# Altium footprint library TIE_2025.PcbLib: 27 footprints (part 1 of 2)
Each footprint in its own frame and in the unit in brackets; x right, y up, seen from the top. Pads: shape width x height; smd on the part's side, far side on the other; paste and mask are expansions set on the pad; w line width, h text height; cw(c..) or ccw(c..) is an arc to the next point about the centre after c.
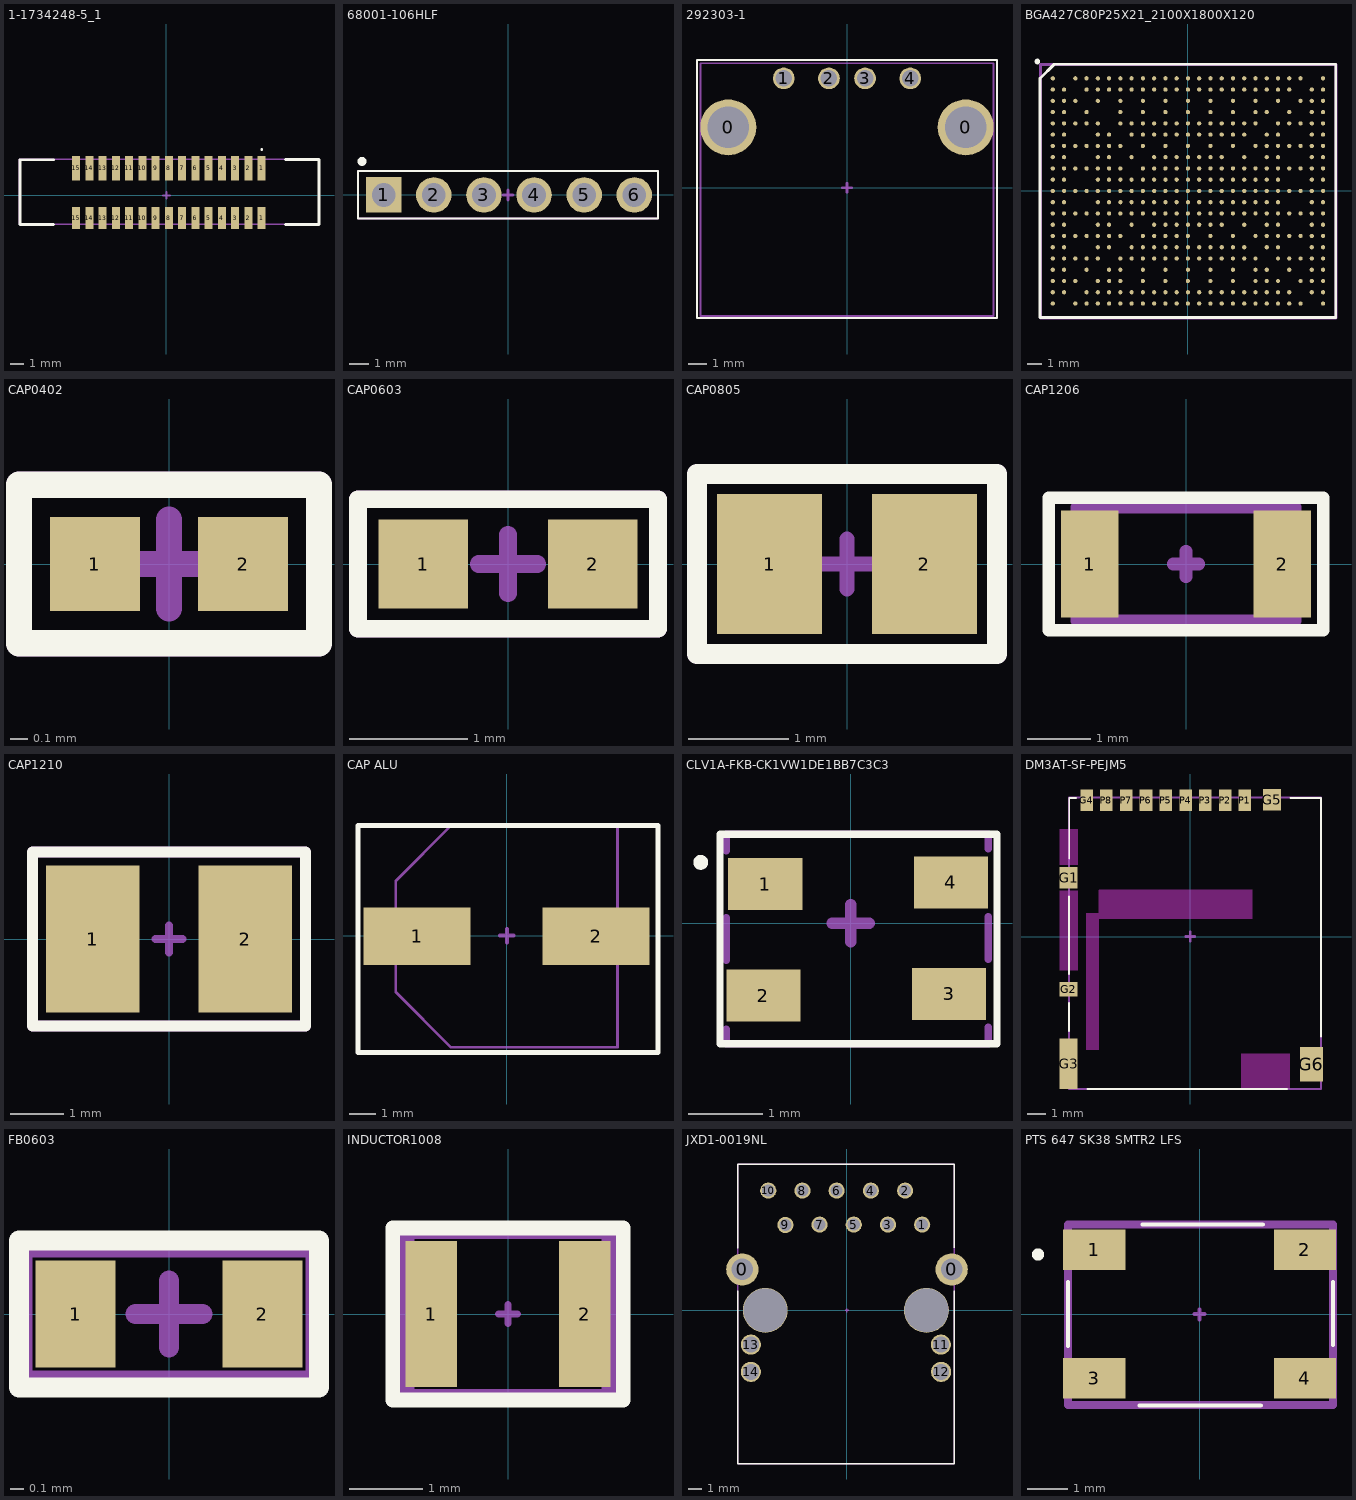
[diagram p0: the footprints below, top view; thin cyan lines are the x and y axes]

## 1-1734248-5_1 [mm] "CON FPC 1mm 15P Female SMD VERT"
pads (30):
  rect 0.6x1.65 smd: 1(7.178,-1.727) 2(6.178,-1.727) 3(5.178,-1.727) 4(4.178,-1.727) 5(3.178,-1.727) 6(2.178,-1.727) 7(1.178,-1.727) 8(0.178,-1.727) 9(-0.822,-1.727) 10(-1.822,-1.727) 11(-2.822,-1.727) 12(-3.822,-1.727) 13(-4.822,-1.727) 14(-5.822,-1.727) 15(-6.822,-1.727)
  rect 0.6x1.85 smd: 1(7.178,2.023) 2(6.178,2.023) 3(5.178,2.023) 4(4.178,2.023) 5(3.178,2.023) 6(2.178,2.023) 7(1.178,2.023) 8(0.178,2.023) 9(-0.822,2.023) 10(-1.822,2.023) 11(-2.822,2.023) 12(-3.822,2.023) 13(-4.822,2.023) 14(-5.822,2.023) 15(-6.822,2.023)
Top Overlay:
  lines w0.1: 7.178,3.398 ccw(c7.178,3.448) 7.178,3.498 ; 7.178,3.398 cw(c7.178,3.448) 7.178,3.498 ; 7.178,3.398 ccw(c7.178,3.448) 7.178,3.498
  lines w0.2: -8.526,-2.2 -11.048,-2.2 -11.048,2.67 -8.526,2.67 ; 8.978,-2.2 11.5,-2.2 11.5,2.698 8.978,2.698
Top Component Center:
  lines w0.15: -0.25,0 0.25,0 ; 0,-0.25 0,0.25
Top Assembly:
  lines w0.1: -11.122,-2.2 -11.122,2.7 11.478,2.7 11.478,-2.2 -11.122,-2.2
  text ".Designator" at -1.244,-0.157 h0.5
3D body "1-1734248-5.stp": height 5.68, standoff 0, extent -11.022,-2.239 11.378,2.611

## 68001-106HLF [mm]
pads (6):
  rect 1.8x1.8 hole 1.2: 1(-6.3,0)
  round 1.8 hole 1.2: 2(-3.76,0) 3(-1.22,0) 4(1.32,0) 5(3.86,0) 6(6.4,0)
Top Overlay:
  circle w0.254: c-7.4,1.7 r0.1
  lines w0.1: -7.6,-1.2 7.6,-1.2 7.6,1.2 -7.6,1.2 -7.6,-1.2
Top Component Center:
  lines w0.15: -0.25,0 0.25,0 ; 0,-0.25 0,0.25
Top Assembly:
  lines w0.1: -7.6,-1.2 7.6,-1.2 7.6,1.2 -7.6,1.2 -7.6,-1.2
  text ".Designator" at -1.219,-0.257 h0.5
3D body "68001-106HLF.stp": height 8.18, standoff -3.25, extent -7.62,-1.213 7.62,1.2

## 292303-1 [mm]
pads (6):
  round 3.1 hole 2.3 mask+0.1: 0(-6.57,3.345) 0(6.57,3.345)
  round 1.2 hole 0.92 mask+0.1: 1(-3.5,6.055) 2(-1,6.055) 3(1,6.055) 4(3.5,6.055)
Top Overlay:
  lines w0.1: -8.3,-7.2 8.3,-7.2 8.3,2.075 8.3,6.605 8.3,7.065 -8.3,7.065 -8.3,5.2 -8.3,1.6 -8.3,-7.2
Top Component Center:
  lines w0.15: -0.25,0 0.25,0 ; 0,-0.25 0,0.25
Top Assembly:
  lines w0.1: -8.1,-7.1 8.1,-7.1 8.1,6.89 -8.1,6.89 -8.1,-7.1
  text ".Designator" at -2.599,-0.167 h0.5
3D body "292303-1.stp": height 8.62, standoff -2.74, extent -8.116,-7.1 8.116,6.9

## BGA427C80P25X21_2100X1800X120 [mm]
pads (427):
  round 0.3 smd mask+0.05: A1(-9.6,8) A3(-8,8) A4(-7.2,8) A5(-6.4,8) A6(-5.6,8) A7(-4.8,8) A8(-4,8) A9(-3.2,8) A10(-2.4,8) A11(-1.6,8) A12(-0.8,8) A13(0,8) A14(0.8,8) A15(1.6,8) A16(2.4,8) A17(3.2,8) A18(4,8) A19(4.8,8) A20(5.6,8) A21(6.4,8) A22(7.2,8) A23(8,8) A25(9.6,8) AA1(-9.6,-8) AA3(-8,-8) AA4(-7.2,-8) AA5(-6.4,-8) AA6(-5.6,-8) AA7(-4.8,-8) AA8(-4,-8) AA9(-3.2,-8) AA10(-2.4,-8) AA11(-1.6,-8) AA12(-0.8,-8) AA13(0,-8) AA14(0.8,-8) AA15(1.6,-8) AA16(2.4,-8) AA17(3.2,-8) AA18(4,-8) AA19(4.8,-8) AA20(5.6,-8) AA21(6.4,-8) AA22(7.2,-8) AA23(8,-8) AA25(9.6,-8) B1(-9.6,7.2) B2(-8.8,7.2) B4(-7.2,7.2) B5(-6.4,7.2) B6(-5.6,7.2) B7(-4.8,7.2) B8(-4,7.2) B9(-3.2,7.2) B10(-2.4,7.2) B11(-1.6,7.2) B12(-0.8,7.2) B13(0,7.2) B14(0.8,7.2) B15(1.6,7.2) B16(2.4,7.2) B17(3.2,7.2) B18(4,7.2) B19(4.8,7.2) B20(5.6,7.2) B21(6.4,7.2) B22(7.2,7.2) B24(8.8,7.2) B25(9.6,7.2) C1(-9.6,6.4) C2(-8.8,6.4) C3(-8,6.4) C5(-6.4,6.4) C7(-4.8,6.4) C9(-3.2,6.4) C11(-1.6,6.4) C13(0,6.4) C15(1.6,6.4) C17(3.2,6.4) C19(4.8,6.4) C21(6.4,6.4) C23(8,6.4) C24(8.8,6.4) C25(9.6,6.4) D1(-9.6,5.6) D2(-8.8,5.6) D4(-7.2,5.6) D7(-4.8,5.6) D9(-3.2,5.6) D11(-1.6,5.6) D13(0,5.6) D15(1.6,5.6) D17(3.2,5.6) D19(4.8,5.6) D20(5.6,5.6) D22(7.2,5.6) D24(8.8,5.6) D25(9.6,5.6) E1(-9.6,4.8) E2(-8.8,4.8) E3(-8,4.8) E4(-7.2,4.8) E5(-6.4,4.8) E7(-4.8,4.8) E8(-4,4.8) E9(-3.2,4.8) E10(-2.4,4.8) E11(-1.6,4.8) E12(-0.8,4.8) E13(0,4.8) E14(0.8,4.8) E15(1.6,4.8) E16(2.4,4.8) E17(3.2,4.8) E18(4,4.8) E19(4.8,4.8) E21(6.4,4.8) E22(7.2,4.8) E23(8,4.8) E24(8.8,4.8) E25(9.6,4.8) F1(-9.6,4) F2(-8.8,4) F5(-6.4,4) F6(-5.6,4) F8(-4,4) F9(-3.2,4) F10(-2.4,4) F11(-1.6,4) F12(-0.8,4) F13(0,4) F14(0.8,4) F15(1.6,4) F16(2.4,4) F17(3.2,4) F18(4,4) F20(5.6,4) F21(6.4,4) F24(8.8,4) F25(9.6,4) G1(-9.6,3.2) G2(-8.8,3.2) G3(-8,3.2) G4(-7.2,3.2) G5(-6.4,3.2) G6(-5.6,3.2) G7(-4.8,3.2) G9(-3.2,3.2) G11(-1.6,3.2) G13(0,3.2) G15(1.6,3.2) G17(3.2,3.2) G19(4.8,3.2) G20(5.6,3.2) G21(6.4,3.2) G22(7.2,3.2) G23(8,3.2) G24(8.8,3.2) G25(9.6,3.2) H1(-9.6,2.4) H2(-8.8,2.4) H5(-6.4,2.4) H6(-5.6,2.4) H8(-4,2.4) H10(-2.4,2.4) H11(-1.6,2.4) H12(-0.8,2.4) H13(0,2.4) H14(0.8,2.4) H15(1.6,2.4) H16(2.4,2.4) H18(4,2.4) H20(5.6,2.4) H21(6.4,2.4) H24(8.8,2.4) H25(9.6,2.4) J1(-9.6,1.6) J2(-8.8,1.6) J3(-8,1.6) J4(-7.2,1.6) J5(-6.4,1.6) J6(-5.6,1.6) J7(-4.8,1.6) J9(-3.2,1.6) J10(-2.4,1.6) J11(-1.6,1.6) J12(-0.8,1.6) J13(0,1.6) J14(0.8,1.6) J15(1.6,1.6) J16(2.4,1.6) J17(3.2,1.6) J18(4,1.6) J19(4.8,1.6) J20(5.6,1.6) J21(6.4,1.6) J22(7.2,1.6) J23(8,1.6) J24(8.8,1.6) J25(9.6,1.6) K1(-9.6,0.8) K2(-8.8,0.8) K5(-6.4,0.8) K6(-5.6,0.8) K7(-4.8,0.8) K8(-4,0.8) K9(-3.2,0.8) K10(-2.4,0.8) K11(-1.6,0.8) K12(-0.8,0.8) K13(0,0.8) K14(0.8,0.8) K15(1.6,0.8) K16(2.4,0.8) K17(3.2,0.8) K18(4,0.8) K19(4.8,0.8) K20(5.6,0.8) K21(6.4,0.8) K24(8.8,0.8) K25(9.6,0.8) L1(-9.6,0) L2(-8.8,0) L3(-8,0) L4(-7.2,0) L5(-6.4,0) L6(-5.6,0) L7(-4.8,0) L8(-4,0) L9(-3.2,0) L10(-2.4,0) L11(-1.6,0) L12(-0.8,0) L13(0,0) L14(0.8,0) L15(1.6,0) L16(2.4,0) L17(3.2,0) L18(4,0) L19(4.8,0) L20(5.6,0) L21(6.4,0) L22(7.2,0) L23(8,0) L24(8.8,0) L25(9.6,0) M1(-9.6,-0.8) M2(-8.8,-0.8) M5(-6.4,-0.8) M6(-5.6,-0.8) M7(-4.8,-0.8) M8(-4,-0.8) M9(-3.2,-0.8) M10(-2.4,-0.8) M11(-1.6,-0.8) M12(-0.8,-0.8) M13(0,-0.8) M14(0.8,-0.8) M15(1.6,-0.8) M16(2.4,-0.8) M17(3.2,-0.8) M18(4,-0.8) M19(4.8,-0.8) M20(5.6,-0.8) M21(6.4,-0.8) M24(8.8,-0.8) M25(9.6,-0.8) N1(-9.6,-1.6) N2(-8.8,-1.6) N3(-8,-1.6) N4(-7.2,-1.6) N5(-6.4,-1.6) N6(-5.6,-1.6) N7(-4.8,-1.6) N8(-4,-1.6) N9(-3.2,-1.6) N10(-2.4,-1.6) N11(-1.6,-1.6) N12(-0.8,-1.6) N13(0,-1.6) N14(0.8,-1.6) N15(1.6,-1.6) N16(2.4,-1.6) N17(3.2,-1.6) N18(4,-1.6) N19(4.8,-1.6) N20(5.6,-1.6) N21(6.4,-1.6) N22(7.2,-1.6) N23(8,-1.6) N24(8.8,-1.6) N25(9.6,-1.6) P1(-9.6,-2.4) P2(-8.8,-2.4) P5(-6.4,-2.4) P6(-5.6,-2.4) P8(-4,-2.4) P10(-2.4,-2.4) P11(-1.6,-2.4) P12(-0.8,-2.4) P13(0,-2.4) P14(0.8,-2.4) P15(1.6,-2.4) P16(2.4,-2.4) P18(4,-2.4) P20(5.6,-2.4) P21(6.4,-2.4) P24(8.8,-2.4) P25(9.6,-2.4) R1(-9.6,-3.2) R2(-8.8,-3.2) R3(-8,-3.2) R4(-7.2,-3.2) R5(-6.4,-3.2) R6(-5.6,-3.2) R7(-4.8,-3.2) R9(-3.2,-3.2) R10(-2.4,-3.2) R11(-1.6,-3.2) R12(-0.8,-3.2) R13(0,-3.2) R15(1.6,-3.2) R17(3.2,-3.2) R19(4.8,-3.2) R20(5.6,-3.2) R21(6.4,-3.2) R22(7.2,-3.2) R23(8,-3.2) R24(8.8,-3.2) R25(9.6,-3.2) T1(-9.6,-4) T2(-8.8,-4) T5(-6.4,-4) T6(-5.6,-4) T8(-4,-4) T9(-3.2,-4) T10(-2.4,-4) T11(-1.6,-4) T12(-0.8,-4) T13(0,-4) T14(0.8,-4) T15(1.6,-4) T16(2.4,-4) T17(3.2,-4) T18(4,-4) T20(5.6,-4) T21(6.4,-4) T24(8.8,-4) T25(9.6,-4) U1(-9.6,-4.8) U2(-8.8,-4.8) U3(-8,-4.8) U4(-7.2,-4.8) U5(-6.4,-4.8) U7(-4.8,-4.8) U8(-4,-4.8) U9(-3.2,-4.8) U10(-2.4,-4.8) U11(-1.6,-4.8) U12(-0.8,-4.8) U13(0,-4.8) U14(0.8,-4.8) U15(1.6,-4.8) U16(2.4,-4.8) U17(3.2,-4.8) U18(4,-4.8) U19(4.8,-4.8) U21(6.4,-4.8) U22(7.2,-4.8) U23(8,-4.8) U24(8.8,-4.8) U25(9.6,-4.8) V1(-9.6,-5.6) V2(-8.8,-5.6) V4(-7.2,-5.6) V6(-5.6,-5.6) V7(-4.8,-5.6) V9(-3.2,-5.6) V11(-1.6,-5.6) V13(0,-5.6) V15(1.6,-5.6) V17(3.2,-5.6) V19(4.8,-5.6) V20(5.6,-5.6) V22(7.2,-5.6) V24(8.8,-5.6) V25(9.6,-5.6) W1(-9.6,-6.4) W2(-8.8,-6.4) W3(-8,-6.4) W5(-6.4,-6.4) W6(-5.6,-6.4) W7(-4.8,-6.4) W9(-3.2,-6.4) W11(-1.6,-6.4) W13(0,-6.4) W15(1.6,-6.4) W17(3.2,-6.4) W19(4.8,-6.4) W20(5.6,-6.4) W21(6.4,-6.4) W23(8,-6.4) W24(8.8,-6.4) W25(9.6,-6.4) Y1(-9.6,-7.2) Y2(-8.8,-7.2) Y4(-7.2,-7.2) Y5(-6.4,-7.2) Y6(-5.6,-7.2) Y7(-4.8,-7.2) Y8(-4,-7.2) Y9(-3.2,-7.2) Y10(-2.4,-7.2) Y11(-1.6,-7.2) Y12(-0.8,-7.2) Y13(0,-7.2) Y14(0.8,-7.2) Y15(1.6,-7.2) Y16(2.4,-7.2) Y17(3.2,-7.2) Y18(4,-7.2) Y19(4.8,-7.2) Y20(5.6,-7.2) Y21(6.4,-7.2) Y22(7.2,-7.2) Y24(8.8,-7.2) Y25(9.6,-7.2)
Top Overlay:
  circle w0.2: c-10.693,9.195 r0.1
  lines w0.2: -10.5,-9 -10.5,8 -9.5,9 10.5,9 10.5,-9 -10.5,-9
Top Assembly:
  lines w0.2: -10.48,-9.02 10.52,-9.02 10.52,8.98 -10.48,8.98 -10.48,-9.02
3D body "SAMA7G54D2G-I_4UB.stp": height 1.2, standoff 0, extent -10.56,-8.99 10.44,9.01

## CAP0402 [mm]
pads (2):
  rect 0.51x0.535 smd mask+0.05: 1(-0.42,0) 2(0.42,0)
Top Overlay:
  lines w0.15: -0.85,-0.45 0.85,-0.45 0.85,0.45 -0.85,0.45 -0.85,-0.45
Top Component Center:
  lines w0.15: -0.25,0 0.25,0 ; 0,-0.25 0,0.25
Top Assembly:
  lines w0.15: -0.85,-0.45 0.85,-0.45 0.85,0.45 -0.85,0.45 -0.85,-0.45
  text ".Designator" at -0.569,-0.257 h0.5
3D body "Ceramic_Capacitor_0402_h20mil.step": height 0.51, standoff 0, extent -0.508,-0.254 0.508,0.254

## CAP0603 [mm]
pads (2):
  rect 0.76x0.76 smd mask+0.05: 1(-0.72,0) 2(0.72,0)
Top Overlay:
  lines w0.15: -1.275,-0.55 1.275,-0.55 1.275,0.55 -1.275,0.55 -1.275,-0.55
Top Component Center:
  lines w0.15: -0.25,0 0.25,0 ; 0,-0.25 0,0.25
Top Assembly:
  lines w0.15: -1.275,-0.55 -1.275,0.55 1.275,0.55 1.275,-0.55 -1.275,-0.55
  text ".Designator" at -0.579,-0.247 h0.5
3D body "Ceramic_Capacitor_0603_h32mil.step": height 0.8, standoff 0, extent -0.8,-0.4 0.8,0.4

## CAP0805 [mm]
pads (2):
  rect 1.05x1.4 smd mask+0.05: 1(-0.775,0) 2(0.775,0)
Top Overlay:
  lines w0.2: -1.5,-0.9 1.5,-0.9 1.5,0.9 -1.5,0.9 -1.5,-0.9
Top Component Center:
  lines w0.15: -0.25,0 0.25,0 ; 0,-0.25 0,0.25
Top Assembly:
  lines w0.2: -1.5,-0.9 1.5,-0.9 1.5,0.9 -1.5,0.9 -1.5,-0.9
  text ".Designator" at -0.549,-0.227 h0.5
3D body "Ceramic_Capacitor_0805_h50mil.step": height 1.26, standoff 0.01, extent -1,-0.625 1,0.625

## CAP1206 [mil]
pads (2):
  rect 35.98x67.01 smd mask+1.97: 1(-60,0) 2(60,0)
Top Overlay:
  lines w7.87: -85.63,-41.34 -85.63,-9.84 -85.63,41.34 62.99,41.34 85.63,41.34 85.63,-19.68 85.63,-41.34 -52.17,-41.34 -85.63,-41.34
Top Component Center:
  lines w7.87: 0,-7.87 0,0 ; 7.87,0 0,0 ; 0,0 0,7.87 0,0 ; 0,0 -7.87,0 0,0
Top Assembly:
  lines w7.87: -67.91,-35.43 67.91,-35.43 67.91,35.43 -67.91,35.43 -67.91,-35.43
  text ".Designator" at -23.98,-8.13 h19.68
3D body "CircuitWorks-CAPACITOR 1206.STEP": height 65.04, standoff -0.32, extent -62.99,-30.7 63,30.71

## CAP1210 [mm]
pads (2):
  rect 1.75x2.75 smd paste+0 mask+0.102: 1(-1.425,0) 2(1.425,0)
Top Overlay:
  lines w0.2: -2.55,-1.625 -2.55,1.625 2.55,1.625 2.55,-1.625 -2.55,-1.625
Top Component Center:
  lines w0.15: -0.25,0 0.25,0 ; 0,-0.25 0,0.25
Top Assembly:
  lines w0.2: -2.55,-1.625 -2.55,1.625 2.55,1.625 2.55,-1.625 -2.55,-1.625
  text ".Designator" at -0.589,-0.237 h0.5
3D body "Cap_Samsung_Electro-Mechanics_America_Inc_CL32C472JBFNNNE_eec.STEP": height 2.8, standoff 0, extent -1.6,-1.25 1.6,1.25

## CAP ALU [mm]
pads (2):
  rect 4x2.15 smd: 1(-3.35,-0.025) 2(3.35,-0.025)
Top Overlay:
  lines w0.2: -5.563,-4.369 -5.563,4.125 -5.35,4.125 4.15,4.125 5.664,4.125 5.664,-4.369 -5.563,-4.369
Top Component Center:
  lines w0.15: -0.24,0 0.26,0 ; 0.01,-0.25 0.01,0.25
Top Assembly:
  lines w0.1: -4.15,-2.1 -4.15,2.05 -2.075,4.125 4.15,4.125 4.15,-4.175 -2.075,-4.175 -4.15,-2.1
  text ".Designator" at -0.549,-0.197 h0.5
3D body "UWT1E331MNL1GS.stp": height 10.5, standoff 0, extent -4.65,-4.275 4.65,4.225

## CLV1A-FKB-CK1VW1DE1BB7C3C3 [mm]
pads (4):
  rect 1x0.7 smd mask+0.05: 1(-1.15,0.525) 2(-1.175,-0.975) 3(1.325,-0.95) 4(1.35,0.55)
Top Overlay:
  lines w0.1: -1.97,0.82 cw(c-2.02,0.82) -1.97,0.824 ; -1.76,-1.625 1.97,-1.625 1.97,1.2 -1.76,1.2 -1.76,-1.625
Mechanical 1:
Top Component Center:
  lines w0.15: -0.25,0 0.25,0 ; 0,-0.25 0,0.25
Top Assembly:
  lines w0.1: -1.675,-1.425 -1.675,-1.625 1.85,-1.625 1.85,-1.4 ; -1.675,-0.5 -1.675,0.075 ; -1.675,0.975 -1.675,1.2 1.85,1.2 1.85,1 ; 1.85,-0.487 1.85,0.088
  text ".Designator" at -0.639,-0.247 h0.5
3D body "CLV1A-FKB-CK1VW1DE1BB7C3C3.stp": height 2.1, standoff 0, extent -1.65,-1.625 1.85,1.175

## DM3AT-SF-PEJM5 [mm]
pads (14):
  rect 1x1.2 smd: G1(-6.75,3.275) G5(4.55,7.6)
  rect 1x0.8 smd: G2(-6.75,-2.925)
  rect 1x2.8 smd: G3(-6.75,-7.075)
  rect 0.7x1.2 smd: G4(-5.75,7.572) P1(3.05,7.572) P2(1.95,7.572) P3(0.85,7.572) P4(-0.25,7.572) P5(-1.35,7.572) P6(-2.45,7.572) P7(-3.55,7.572) P8(-4.65,7.572)
  rect 1.3x1.9 smd: G6(6.75,-7.1)
Top Overlay:
  lines w0.1: -6.735,-3.701 -6.725,-5.25 ; -6.735,-2.101 -6.735,2.225 ; -6.71,4.325 -6.71,7.703 -6.329,7.703 ; -5.694,-8.475 5.4,-8.475 ; 5.584,7.703 7.285,7.703 7.285,-5.563
Keep-Out Layer:
  region: -7.245,2.55 -6.255,2.55 -6.255,-1.87 -7.245,-1.87
  region: -7.241,5.966 -6.25,5.966 -6.25,4.003 -7.241,3.997
  region: -5.065,2.575 -5.039,2.6 3.45,2.6 3.45,1 3.114,1 -5.065,1
  region: -5.777,1.3 -5.073,1.3 -5.073,-6.3 -5.777,-6.3
  region: 2.85,-6.525 5.55,-6.525 5.55,-8.425 2.85,-8.425
Top Component Center:
  lines w0.15: -0.24,0 0.26,0 ; 0.01,-0.25 0.01,0.25
Top Assembly:
  lines w0.1: -6.725,-8.475 7.275,-8.475 7.275,7.725 -6.725,7.725 -6.725,-8.475
  text ".Designator" at -0.319,-0.687 h0.5
3D body "DM3AT-SF-PEJM5.stp": height 1.64, standoff -0.04, extent -6.725,-8.4 7.224,7.75

## FB0603 [mm]
pads (2):
  rect 0.6x0.8 smd mask+0.05: 1(-0.7,0) 2(0.7,0)
Top Overlay:
  lines w0.15: -1.125,-0.55 -1.125,0.55 1.125,0.55 1.125,-0.55 -1.125,-0.55
Top Component Center:
  lines w0.15: -0.25,0 0.25,0 ; 0,-0.25 0,0.25
Top Assembly:
  lines w0.15: -1.1,-0.5 1.1,-0.5 1.1,0.5 -1.1,0.5 -1.1,-0.5
  text ".Designator" at -0.569,-0.247 h0.5
3D body "0603_RES.stp": height 0.46, standoff 0, extent -0.8,-0.4 0.8,0.4

## INDUCTOR1008 [mm]
pads (2):
  rect 0.7x2 smd mask+0.05: 1(-1.05,0) 2(1.05,0)
Top Overlay:
  lines w0.2: -1.575,-1.175 1.575,-1.175 1.575,1.175 -1.575,1.175 -1.575,-1.175
Top Component Center:
  lines w0.1: -0.125,0 0.125,0 ; 0,-0.125 0,0.125
Top Assembly:
  lines w0.2: -1.375,-1.125 1.375,-1.125 1.375,1.125 -1.375,1.125 -1.375,-1.125
  text ".Designator" at -0.559,-0.237 h0.5
3D body "DFE252012PD-R47M=P2.STEP": height 1.2, standoff 0, extent -1.25,-1 1.25,1

## JXD1-0019NL [mm]
pads (18):
  round 2.4 hole 1.6 mask+0.05: 0(-7.775,3.039) 0(7.775,3.039)
  round 1.2 hole 0.9 mask+0.05: 1(5.582,6.364) 2(4.312,8.889) 3(3.042,6.364) 4(1.772,8.889) 5(0.502,6.364) 6(-0.768,8.889) 7(-2.038,6.364) 8(-3.308,8.889) 9(-4.578,6.339) 10(-5.848,8.889)
  round 1.5 hole 1.2 mask+0.05: 11(6.972,-2.541) 12(6.987,-4.571) 13(-7.138,-2.541) 14(-7.138,-4.571)
  round 3.33 hole 3.25 unplated mask+0.05: ""(-6.068,-0.001) ""(5.902,-0.001)
Top Overlay:
  lines w0.1: -8.128,1.443 -8.128,-11.41 7.975,-11.41 7.975,1.473 ; -8.128,4.618 -8.128,10.867 7.963,10.867 7.963,4.661
Top Component Center:
  lines w0.1: -0.125,0 0.125,0 ; 0,-0.133 0,0.117
Top Assembly:
  lines w0.1: 7.959,-10.433 7.959,-11.408 7.712,-11.408 -8.128,-11.408 -8.128,10.867 7.962,10.867 7.962,-10.628
  text ".Designator" at -2.423,2.064 h0.5
3D body "JXD1-0019NL_3D.STEP": height 13.7, standoff -3.7, extent -8.154,-11.359 7.896,10.891

## PTS 647 SK38 SMTR2 LFS [mm]
pads (4):
  rect 1.55x1 smd mask+0.05: 1(-2.625,1.6) 2(2.625,1.6) 3(-2.625,-1.6) 4(2.625,-1.6)
Top Overlay:
  lines w0.1: -3.275,-0.8 -3.275,0.8 ; -1.5,-2.275 1.525,-2.275 ; -1.425,2.225 1.575,2.225 ; 3.325,-0.775 3.325,0.8
  lines w0.2: -4.075,1.483 cw(c-4.025,1.483) -3.975,1.483 cw(c-4.025,1.483) -4.075,1.483
Top Component Center:
  lines w0.1: -0.125,0 0.125,0 ; 0,-0.133 0,0.117
Top Assembly:
  lines w0.2: -3.275,-2.267 3.325,-2.267 3.325,2.233 -3.275,2.233 -3.275,-2.267
  text ".Designator" at -0.549,-0.267 h0.5
3D body "PTS647SK38SMTR2LFS.stp": height 3.8, standoff 0, extent -3.225,-2.275 3.275,2.225